# EAGLE library part TPS631000DRLR (library TPS631000DRLR)
Switching Voltage Regulators 1.5-A output current, high power density buck-boost converter Source: Datasheet <https://www.ti.com/lit/ds/symlink/tps631000.pdf?ts=1652152702265>
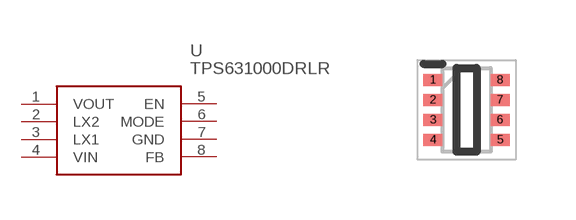
[diagram p0: symbol with the pads of SOTFL50P160X60-8N; footprint SOTFL50P160X60-8N]

Designator prefix U

## TPS631000DRLR (Description: Switching Voltage Regulators 1.5-A output current, high power density buck-boost converter; Height: 0.6mm; Manufacturer_Name: Texas Instruments; Manufacturer_Part_Number: TPS631000DRLR; Mouser_Part_Number: 595-TPS631000DRLR; Mouser_Price-Stock: https://www.mouser.co.uk/ProductDetail/Texas-Instruments/TPS631000DRLR?qs=rSMjJ%252B1ewcRYwoN2deTeNA%3D%3D)  [SOTFL50P160X60-8N]
1  VOUT
2  LX2
3  LX1
4  VIN
5  EN
6  MODE
7  GND
8  FB

## Footprint SOTFL50P160X60-8N (pad centres in mm)
DRL0008A
smd 0.475 x 0.3: 1 -0.838,0.75; 2 -0.838,0.25; 3 -0.838,-0.25; 4 -0.838,-0.75; 5 0.838,-0.75; 6 0.838,-0.25; 7 0.838,0.25; 8 0.838,0.75